# EAGLE library part RK3576 (library RK3576)
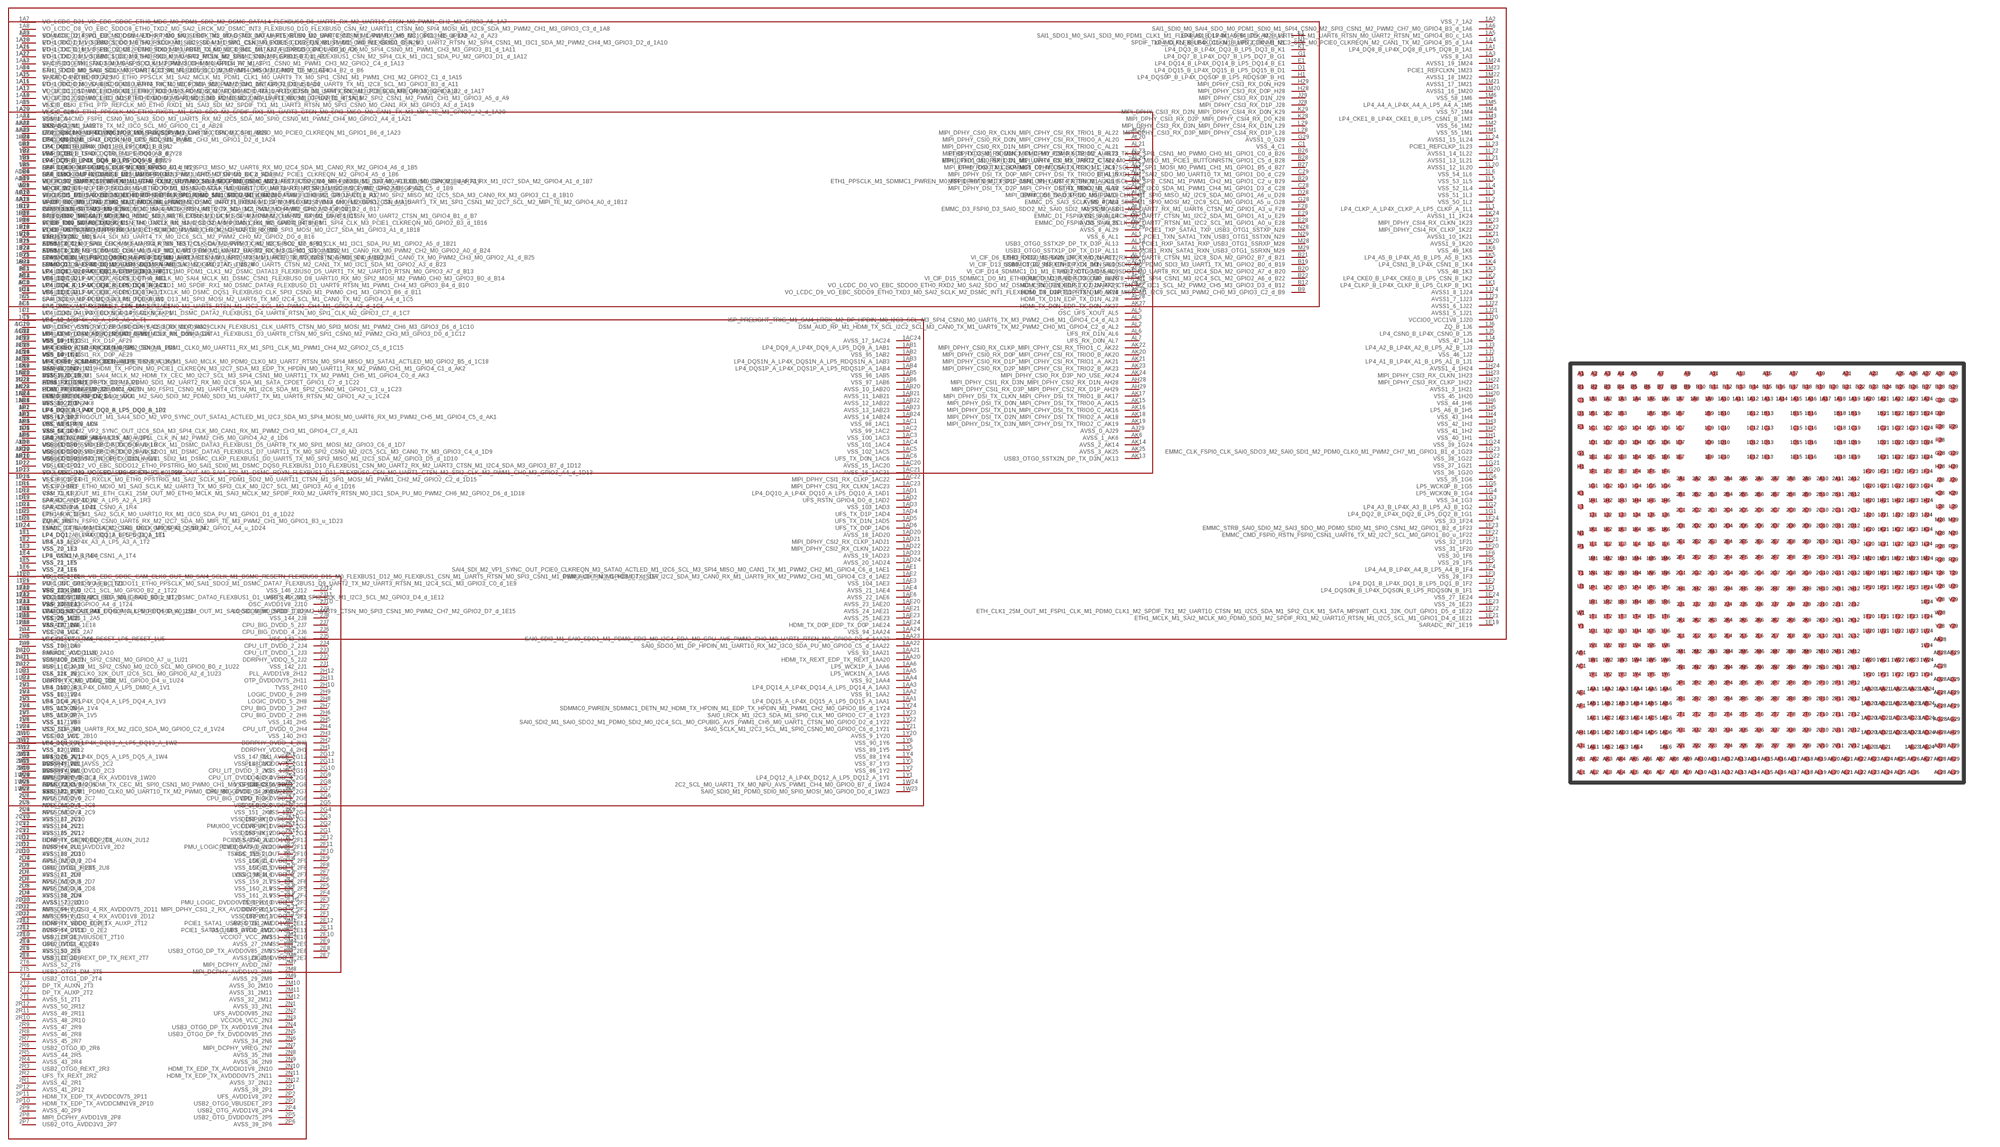
[diagram p0: symbol with the pads of FCCSP-698_L17.2-W16.1-TL_RK3576; footprint FCCSP-698_L17.2-W16.1-TL_RK3576]

Designator prefix U; gates U$1=RK3576_1_DDR_INTERFACE U$2=RK3576_2_CPU_SYS_CONTROL U$3=RK3576_3_VIDEO_CSI_DSI U$4=RK3576_4_HIGH_SPEED_PCIE_USB U$5=RK3576_5_GPIO_AUDIO_SARADC U$6=RK3576_6_POWER_GND

## RK3576  [FCCSP-698_L17.2-W16.1-TL_RK3576]
1A1  U$3:LP4_DQ8_B_LP4X_DQ8_B_LP5_DQ8_B_1A1
1A2  U$3:VSS_7_1A2
1A3  U$3:VSS_8_1A3
1A4  U$3:SPDIF_TX0_M0_FLEXBUS0_D15_M1_UART2_TX_M1_I2C3_SCL_M0_PCIE0_CLKREQN_M2_CAN1_TX_M2_GPIO4_B5_d_1A4
1A5  U$3:SAI1_SDO1_M0_SAI1_SDI3_M0_PDM1_CLK1_M1_FLEXBUS1_D13_M1_SPI4_CLK_M2_UART5_TX_M1_UART6_RTSN_M0_UART2_RTSN_M1_GPIO4_B0_c_1A5
1A6  U$3:SAI1_SDI0_M0_SAI4_SDO_M0_PDM1_SDI0_M1_SPI4_CSN0_M2_SPI3_CSN1_M2_PWM2_CH7_M0_GPIO4_B3_d_1A6
1A7  U$3:VO_LCDC_D21_VO_EBC_GDOE_ETH0_MDC_M0_PDM1_SDI2_M2_DSMC_DATA14_FLEXBUS0_D6_UART1_RX_M2_UART10_CTSN_M0_PWM1_CH2_M3_GPIO3_A6_1A7
1A8  U$3:VO_LCDC_D8_VO_EBC_SDDO8_ETH0_TXD2_M0_SAI2_LRCK_M2_DSMC_INT3_FLEXBUS0_D10_FLEXBUS0_CSN_M2_UART11_CTSN_M0_SPI4_MOSI_M1_I2C9_SDA_M3_PWM2_CH1_M3_GPIO3_C3_d_1A8
1A9  U$3:VO_LCDC_D14_VO_EBC_SDDO14_ETH0_TXD0_M0_SPDIF_TX1_M0_DSMC_DATA8_FLEXBUS0_D0_UART9_CTSN_M1_PWM1_CH5_M3_GPIO3_B5_d_1A9
1A10  U$3:VO_LCDC_D1_VO_EBC_SDDO1_ETH0_RXD3_M0_SAI2_SDI_M2_DSMC_CSN3_FLEXBUS0_D12_FLEXBUS1_D15_M0_FLEXBUS0_CSN_M3_UART2_RTSN_M2_SPI4_CSN1_M1_I3C1_SDA_M2_PWM2_CH4_M3_GPIO3_D2_d_1A10
1A11  U$3:VO_LCDC_D18_VO_EBC_SDCE2_ETH0_RXD1_M0_PDM1_CLK0_M2_DSMC_DATA12_FLEXBUS0_D4_UART10_TX_M0_SPI4_CSN0_M1_PWM1_CH3_M3_GPIO3_B1_d_1A11
1A12  U$3:VO_LCDC_D2_VO_EBC_SDDO2_ETH0_RXCLK_M0_SAI2_MCLK_M2_DSMC_CSN2_FLEXBUS0_D11_FLEXBUS1_CSN_M2_SPI4_CLK_M1_I3C1_SDA_PU_M2_GPIO3_D1_d_1A12
1A13  U$3:VI_CIF_D1_ETH1_TXD3_M0_SAI2_SDO_M1_PDM1_SDI0_M0_UART11_TX_M1_SPI1_CSN0_M1_PWM1_CH3_M2_GPIO2_C4_d_1A13
1A14  U$3:ETH1_TXD0_M0_SAI4_SCLK_M3_UART4_CTSN_M0_I2C5_SCL_M2_PWM1_CH5_M2_GPIO2_C6_d_1A14
1A15  U$3:VI_CIF_D4_ETH1_RXD3_M0_ETH0_PPSCLK_M1_SAI2_MCLK_M1_PDM1_CLK1_M0_UART9_TX_M0_SPI1_CSN1_M1_PWM1_CH1_M2_GPIO2_C1_d_1A15
1A16  U$3:ETH1_RXD0_M0_SAI4_SDO_M3_UART4_RX_M0_I2C6_SDA_M2_PWM2_CH1_M2_GPIO2_D1_d_1A16
1A17  U$3:VI_CIF_D11_SDMMC1_CMD_M1_ETH0_TXD3_M1_SAI0_SDI2_M0_PDM0_SDI1_M3_UART1_CTSN_M1_SPI4_CSN0_M3_PCIE0_CLKREQN_M0_GPIO2_B2_d_1A17
1A18  U$3:VI_CIF_D12_SDMMC1_D3_M1_ETH0_TXD0_M1_SAI0_SDI1_M0_PDM0_SDI2_M3_UART1_RX_M1_GPIO2_B1_d_1A18
1A19  U$3:VI_CIF_CLKI_ETH1_PTP_REFCLK_M0_ETH0_RXD1_M1_SAI3_SDI_M2_SPDIF_TX1_M1_UART3_RTSN_M0_SPI3_CSN0_M0_CAN1_RX_M3_GPIO3_A3_d_1A19
1A20  U$3:VI_CIF_CLKO_ETH1_PPSCLK_M0_ETH0_RXCTL_M1_SAI3_SDO_M2_SPDIF_RX1_M1_UART3_CTSN_M0_SPI3_MISO_M0_CAN1_TX_M3_MIPI_TE_M1_GPIO3_A2_d_1A20
1A21  U$3:SDMMC0_CMD_FSPI1_CSN0_M0_SAI3_SDO_M3_UART5_RX_M2_I2C5_SDA_M0_SPI0_CSN0_M1_PWM2_CH4_M0_GPIO2_A4_d_1A21
1A22  U$3:SARADC_IN1_1A22
1A23  U$3:ETH1_RXCLK_M1_SDMMC1_D2_M0_SAI3_SDO_M1_UART3_CTSN_M2_SPI1_MISO_M0_PCIE0_CLKREQN_M1_GPIO1_B6_d_1A23
1A24  U$3:ETH1_MDC_M1_SAI2_LRCK_M0_I3C0_SCL_M1_PWM1_CH3_M1_GPIO1_D2_d_1A24
1AA1  U$4:LP4_DQ15_A_LP4X_DQ15_A_LP5_DQ15_A_1AA1
1AA2  U$4:VSS_91_1AA2
1AA3  U$4:LP4_DQ14_A_LP4X_DQ14_A_LP5_DQ14_A_1AA3
1AA4  U$4:VSS_92_1AA4
1AA5  U$4:LP5_WCK1N_A_1AA5
1AA6  U$4:LP5_WCK1P_A_1AA6
1AA20  U$4:HDMI_TX_REXT_EDP_TX_REXT_1AA20
1AA21  U$4:VSS_93_1AA21
1AA22  U$4:SAI0_SDO0_M1_DP_HPDIN_M1_UART10_RX_M2_I3C0_SDA_PU_M0_GPIO0_C5_d_1AA22
1AA23  U$4:SAI0_SDI3_M1_SAI0_SDO1_M1_PDM0_SDI3_M0_I2C4_SDA_M0_GPU_AVS_PWM2_CH0_M0_UART1_RTSN_M0_GPIO0_D3_d_1AA23
1AA24  U$4:VSS_94_1AA24
1AB1  U$4:LP4_DQ9_A_LP4X_DQ9_A_LP5_DQ9_A_1AB1
1AB2  U$4:VSS_95_1AB2
1AB3  U$4:LP4_DQS1N_A_LP4X_DQS1N_A_LP5_RDQS1N_A_1AB3
1AB4  U$4:LP4_DQS1P_A_LP4X_DQS1P_A_LP5_RDQS1P_A_1AB4
1AB5  U$4:VSS_96_1AB5
1AB6  U$4:VSS_97_1AB6
1AB20  U$4:AVSS_10_1AB20
1AB21  U$4:AVSS_11_1AB21
1AB22  U$4:AVSS_12_1AB22
1AB23  U$4:AVSS_13_1AB23
1AB24  U$4:AVSS_14_1AB24
1AC1  U$4:VSS_98_1AC1
1AC2  U$4:VSS_99_1AC2
1AC3  U$4:VSS_100_1AC3
1AC4  U$4:VSS_101_1AC4
1AC5  U$4:VSS_102_1AC5
1AC6  U$4:UFS_TX_D0N_1AC6
1AC20  U$4:AVSS_15_1AC20
1AC21  U$4:AVSS_16_1AC21
1AC22  U$4:MIPI_DPHY_CSI1_RX_CLKP_1AC22
1AC23  U$4:MIPI_DPHY_CSI1_RX_CLKN_1AC23
1AC24  U$4:AVSS_17_1AC24
1AD1  U$4:LP4_DQ10_A_LP4X_DQ10_A_LP5_DQ10_A_1AD1
1AD2  U$4:UFS_RSTN_GPIO4_D0_d_1AD2
1AD3  U$4:VSS_103_1AD3
1AD4  U$4:UFS_TX_D1P_1AD4
1AD5  U$4:UFS_TX_D1N_1AD5
1AD6  U$4:UFS_TX_D0P_1AD6
1AD20  U$4:AVSS_18_1AD20
1AD21  U$4:MIPI_DPHY_CSI2_RX_CLKP_1AD21
1AD22  U$4:MIPI_DPHY_CSI2_RX_CLKN_1AD22
1AD23  U$4:AVSS_19_1AD23
1AD24  U$4:AVSS_20_1AD24
1AE1  U$4:SAI4_SDI_M2_VP1_SYNC_OUT_PCIE0_CLKREQN_M3_SATA0_ACTLED_M1_I2C6_SCL_M3_SPI4_MISO_M0_CAN1_TX_M1_PWM2_CH2_M1_GPIO4_C6_d_1AE1
1AE2  U$4:DSM_AUD_RN_M1_HDMI_TX_SDA_I2C2_SDA_M3_CAN0_RX_M1_UART9_RX_M2_PWM2_CH1_M1_GPIO4_C3_d_1AE2
1AE3  U$4:VSS_104_1AE3
1AE4  U$4:AVSS_21_1AE4
1AE6  U$4:AVSS_22_1AE6
1AE20  U$4:AVSS_23_1AE20
1AE21  U$4:AVSS_24_1AE21
1AE23  U$4:AVSS_25_1AE23
1AE24  U$4:HDMI_TX_D0P_EDP_TX_D0P_1AE24
1B1  U$3:LP4_DMI1_B_LP4X_DMI1_B_LP5_DMI1_B_1B1
1B2  U$3:VSS_9_1B2
1B3  U$3:LP4_DQ5_B_LP4X_DQ5_B_LP5_DQ5_B_1B3
1B5  U$3:SAI4_LRCK_M0_PDM1_CLK0_M1_FLEXBUS0_D14_M1_SPI3_MISO_M2_UART6_RX_M0_I2C4_SDA_M1_CAN0_RX_M2_GPIO4_A6_d_1B5
1B6  U$3:SAI1_LRCK_M0_FLEXBUS1_D12_M1_SPI4_CSN1_M2_UART5_CTSN_M1_I2C2_SDA_M2_PCIE1_CLKREQN_M2_GPIO4_A5_d_1B6
1B7  U$3:VO_POST_EMPTY_SPDIF_TX0_M1_CAM_CLK2_OUT_M0_SAI4_SDO_M1_DSMC_INT2_FLEXBUS0_D14_M0_FLEXBUS1_D13_M0_FLEXBUS0_CSN_M1_UART3_RX_M1_I2C7_SDA_M2_GPIO4_A1_d_1B7
1B9  U$3:VO_LCDC_D6_VO_EBC_SDDO6_SAI1_SDO0_M1_DSMC_DATA4_FLEXBUS1_D6_UART8_RX_M0_SPI1_MISO_M2_PWM2_CH2_M3_GPIO3_C5_d_1B9
1B10  U$3:VO_LCDC_D10_VO_EBC_SDDO10_ETH0_PTP_REFCLK_M0_SAI1_SDO2_M1_DSMC_DATA6_FLEXBUS1_D8_UART11_RX_M0_SPI2_MISO_M2_I2C5_SDA_M3_CAN0_RX_M3_GPIO3_C1_d_1B10
1B12  U$3:SPDIF_RX0_M1_CAM_CLK1_OUT_M0_SAI4_LRCK_M1_DSMC_INT0_FLEXBUS0_D13_M0_FLEXBUS1_D14_M0_FLEXBUS1_CSN_M3_UART3_TX_M1_SPI1_CSN1_M2_I2C7_SCL_M2_MIPI_TE_M2_GPIO4_A0_d_1B12
1B13  U$3:ISP_PRELIGHT_TRIG_M0_ETH1_MDC_M0_UART6_RTSN_M1_I2C9_SDA_M2_PWM2_CH4_M2_GPIO2_D4_d_1B13
1B15  U$3:SP_FLASH_TRIGOUT_M0_ETH1_MDIO_M0_UART6_CTSN_M1_I2C9_SCL_M2_PWM2_CH5_M2_GPIO2_D5_d_1B15
1B16  U$3:VI_CIF_D10_SDMMC1_CLK_M1_ETH0_TXCLK_M1_SAI0_SDO2_M0_PDM0_CLK1_M3_UART1_RTSN_M1_SPI4_CLK_M3_PCIE1_CLKREQN_M0_GPIO2_B3_d_1B16
1B18  U$3:VI_CIF_VSYNC_ETH1_PPSTRIG_M0_ETH0_MDC_M1_SAI3_LRCK_M2_UART3_RX_M0_SPI3_MOSI_M0_I2C7_SDA_M1_GPIO3_A1_d_1B18
1B19  U$3:SARADC_IN2_1B19
1B21  U$3:SDMMC0_CLK_FSPI1_CLK_M0_SAI3_SCLK_M3_TEST_CLK_OUT_UART5_TX_M2_I2C5_SCL_M0_SPI0_CLK_M1_I3C1_SDA_PU_M1_GPIO2_A5_d_1B21
1B22  U$3:ETH1_TXCLK_M1_SDMMC1_CLK_M0_SAI3_MCLK_M1_PDM0_CLK0_M2_UART3_RX_M2_GPIO1_C1_d_1B22
1B23  U$3:ETH1_TXD0_M1_FSPI1_D0_M1_UART4_TX_M1_UART2_RTSN_M0_SPI2_MOSI_M1_PCIE0_BUTTONRSTN_GPIO1_C4_d_1B23
1B24  U$3:EMMC_D7_SAI0_SDO0_M2_SAI3_SDI_M0_SPI0_CLK_M2_GPIO1_A7_u_1B24
1C1  U$3:LP4_DQ13_B_LP4X_DQ13_B_LP5_DQ13_B_1C1
1C2  U$3:VSS_10_1C2
1C3  U$3:LP4_DQ4_B_LP4X_DQ4_B_LP5_DQ4_B_1C3
1C4  U$3:VSS_11_1C4
1C5  U$3:SAI4_SCLK_M0_PDM1_SDI3_M1_FLEXBUS0_D13_M1_SPI3_MOSI_M2_UART6_TX_M0_I2C4_SCL_M1_CAN0_TX_M2_GPIO4_A4_d_1C5
1C6  U$3:SAI1_SCLK_M0_FLEXBUS1_CSN_M4_SPI3_CSN0_M2_UART5_RTSN_M1_I2C2_SCL_M2_PWM2_CH4_M1_GPIO4_A3_d_1C6
1C7  U$3:VO_LCDC_D4_VO_EBC_SDDO4_SAI1_SCLK_M1_DSMC_DATA2_FLEXBUS1_D4_UART8_RTSN_M0_SPI1_CLK_M2_GPIO3_C7_d_1C7
1C9  U$3:VSS_12_1C9
1C10  U$3:VO_LCDC_VSYNC_VO_EBC_SDCLK_SAI1_SDI3_M1_DSMC_CLKN_FLEXBUS1_CLK_UART5_CTSN_M0_SPI3_MOSI_M1_PWM2_CH6_M3_GPIO3_D6_d_1C10
1C12  U$3:VO_LCDC_D3_VO_EBC_SDDO3_SAI1_MCLK_M1_DSMC_DATA1_FLEXBUS1_D3_UART8_CTSN_M0_SPI1_CSN0_M2_PWM2_CH3_M3_GPIO3_D0_d_1C12
1C13  U$3:VSS_13_1C13
1C15  U$3:VI_CIF_D0_ETH1_TXCLK_M0_SAI2_SDI_M1_PDM1_CLK0_M0_UART11_RX_M1_SPI1_CLK_M1_PWM1_CH4_M2_GPIO2_C5_d_1C15
1C16  U$3:VSS_14_1C16
1C18  U$3:VI_CIF_D8_SDMMC1_DETN_M1_ETH0_RXCLK_M1_SAI0_MCLK_M0_PDM0_CLK0_M3_UART7_RTSN_M0_SPI4_MISO_M3_SATA1_ACTLED_M0_GPIO2_B5_d_1C18
1C19  U$3:SARADC_IN3_1C19
1C21  U$3:VSS_15_1C21
1C22  U$3:ETH1_RXD0_M1_FSPI1_D3_M1_PDM0_SDI1_M2_UART2_RX_M0_I2C8_SDA_M1_SATA_CPDET_GPIO1_C7_d_1C22
1C23  U$3:ETH1_PPSTRIG_M1_SDMMC1_DETN_M0_FSPI1_CSN0_M1_UART4_CTSN_M1_I2C6_SDA_M1_SPI2_CSN0_M1_GPIO1_C3_u_1C23
1C24  U$3:EMMC_D2_FSPI0_D2_SAI0_SDO1_M2_SAI0_SDI3_M2_PDM0_SDI3_M1_UART7_TX_M1_UART6_RTSN_M2_GPIO1_A2_u_1C24
1D1  U$3:VSS_16_1D1
1D2  U$3:LP4_DQ0_B_LP4X_DQ0_B_LP5_DQ0_B_1D2
1D3  U$3:VSS_17_1D3
1D4  U$3:LP5_WCK1P_B_1D4
1D5  U$3:VSS_18_1D5
1D6  U$3:SAI1_MCLK_M0_SAI4_MCLK_M0_AUPLL_CLK_IN_M2_PWM2_CH5_M0_GPIO4_A2_d_1D6
1D7  U$3:VO_LCDC_D5_VO_EBC_SDDO5_SAI1_LRCK_M1_DSMC_DATA3_FLEXBUS1_D5_UART8_TX_M0_SPI1_MOSI_M2_GPIO3_C6_d_1D7
1D9  U$3:VO_LCDC_D7_VO_EBC_SDDO7_SAI1_SDO1_M1_DSMC_DATA5_FLEXBUS1_D7_UART11_TX_M0_SPI2_CSN0_M2_I2C5_SCL_M3_CAN0_TX_M3_GPIO3_C4_d_1D9
1D10  U$3:VO_LCDC_HSYNC_VO_EBC_GDCLK_SAI1_SDI2_M1_DSMC_CLKP_FLEXBUS1_D0_UART5_TX_M0_SPI3_MISO_M1_I2C3_SDA_M2_GPIO3_D5_d_1D10
1D12  U$3:VO_LCDC_D12_VO_EBC_SDDO12_ETH0_PPSTRIG_M0_SAI1_SDI0_M1_DSMC_DQS0_FLEXBUS1_D10_FLEXBUS1_CSN_M0_UART2_RX_M2_UART3_CTSN_M1_I2C4_SDA_M3_GPIO3_B7_d_1D12
1D13  U$3:VO_LCDC_D23_VO_EBC_SDSHR_ETH_CLK0_25M_OUT_M0_SAI4_SDI_M1_DSMC_RDYN_FLEXBUS1_D11_FLEXBUS0_CSN_M0_UART1_CTSN_M2_SPI2_CLK_M2_PWM1_CH0_M3_GPIO3_A4_d_1D13
1D15  U$3:VI_CIF_D3_ETH1_RXCLK_M0_ETH0_PPSTRIG_M1_SAI2_SCLK_M1_PDM1_SDI2_M0_UART11_CTSN_M1_SPI1_MOSI_M1_PWM1_CH2_M2_GPIO2_C2_d_1D15
1D16  U$3:VI_CIF_HREF_ETH0_MDIO_M1_SAI3_SCLK_M2_UART3_TX_M0_SPI3_CLK_M0_I2C7_SCL_M1_GPIO3_A0_d_1D16
1D18  U$3:CAM_CLK1_OUT_M1_ETH_CLK1_25M_OUT_M0_ETH0_MCLK_M1_SAI3_MCLK_M2_SPDIF_RX0_M2_UART9_RTSN_M0_I3C1_SDA_PU_M0_PWM2_CH6_M2_GPIO2_D6_d_1D18
1D19  U$3:SARADC_IN5_1D19
1D21  U$3:SARADC_IN6_1D21
1D22  U$3:ETH1_RXCTL_M1_SAI2_SCLK_M0_UART10_RX_M1_I3C0_SDA_PU_M1_GPIO1_D1_d_1D22
1D23  U$3:EMMC_RSTN_FSPI0_CSN0_UART6_RX_M2_I2C7_SDA_M0_MIPI_TE_M3_PWM2_CH1_M0_GPIO1_B3_u_1D23
1D24  U$3:EMMC_D4_SAI0_MCLK_M2_SAI3_MCLK_M0_SPI0_CSN0_M2_GPIO1_A4_u_1D24
1E1  U$3:LP4_DQ12_B_LP4X_DQ12_B_LP5_DQ1_1E1
1E2  U$3:VSS_19_1E2
1E3  U$3:VSS_20_1E3
1E4  U$3:LP5_WCK1N_B_1E4
1E5  U$3:VSS_21_1E5
1E6  U$3:VSS_22_1E6
1E7  U$3:VO_LCDC_CLK_VO_EBC_SDOE_CAM_CLK0_OUT_M0_SAI4_SCLK_M1_DSMC_RESETN_FLEXBUS0_D15_M0_FLEXBUS1_D12_M0_FLEXBUS1_CSN_M1_UART5_RTSN_M0_SPI3_CSN1_M1_PWM2_CH7_M3_GPIO3_D7_d_1E7
1E9  U$3:VO_LCDC_D11_VO_EBC_SDDO11_ETH0_PPSCLK_M0_SAI1_SDO3_M1_DSMC_DATA7_FLEXBUS1_D9_UART2_TX_M2_UART3_RTSN_M1_I2C4_SCL_M3_GPIO3_C0_d_1E9
1E10  U$3:VSS_23_1E10
1E12  U$3:VO_LCDC_DEN_VO_EBC_SDLE_SAI1_SDI1_M1_DSMC_DATA0_FLEXBUS1_D1_UART5_RX_M0_SPI3_CLK_M1_I2C3_SCL_M2_GPIO3_D4_d_1E12
1E13  U$3:VSS_24_1E13
1E15  U$3:CAM_CLK2_OUT_M1_ETH1_MCLK_M0_ETH_CLK0_25M_OUT_M1_SAI0_SDO3_M0_SPDIF_TX0_M2_UART9_CTSN_M0_SPI3_CSN1_M0_PWM2_CH7_M2_GPIO2_D7_d_1E15
1E16  U$3:VSS_25_1E16
1E18  U$3:SARADC_IN4_1E18
1E19  U$3:SARADC_IN7_1E19
1E21  U$3:ETH1_MCLK_M1_SAI2_MCLK_M0_PDM0_SDI3_M2_SPDIF_RX1_M2_UART10_RTSN_M1_I2C5_SCL_M1_GPIO1_D4_d_1E21
1E22  U$3:ETH_CLK1_25M_OUT_M1_FSPI1_CLK_M1_PDM0_CLK1_M2_SPDIF_TX1_M2_UART10_CTSN_M1_I2C5_SDA_M1_SPI2_CLK_M1_SATA_MPSWIT_CLK1_32K_OUT_GPIO1_D5_d_1E22
1E23  U$3:VSS_26_1E23
1E24  U$3:VSS_27_1E24
1F1  U$3:LP4_DQS0N_B_LP4X_DQS0N_B_LP5_RDQS0N_B_1F1
1F2  U$3:LP4_DQ1_B_LP4X_DQ1_B_LP5_DQ1_B_1F2
1F3  U$3:VSS_28_1F3
1F4  U$3:LP4_A4_B_LP4X_A4_B_LP5_A4_B_1F4
1F5  U$3:VSS_29_1F5
1F6  U$3:VSS_30_1F6
1F20  U$3:VSS_31_1F20
1F21  U$3:VSS_32_1F21
1F22  U$3:EMMC_CMD_FSPI0_RSTN_FSPI0_CSN1_UART6_TX_M2_I2C7_SCL_M0_GPIO1_B0_u_1F22
1F23  U$3:EMMC_STRB_SAI0_SDI0_M2_SAI3_SDO_M0_PDM0_SDI0_M1_SPI0_CSN1_M2_GPIO1_B2_d_1F23
1F24  U$3:VSS_33_1F24
1G1  U$3:LP4_DQ2_B_LP4X_DQ2_B_LP5_DQ2_B_1G1
1G2  U$3:LP4_A3_B_LP4X_A3_B_LP5_A3_B_1G2
1G3  U$3:VSS_34_1G3
1G4  U$3:LP5_WCK0N_B_1G4
1G5  U$3:LP5_WCK0P_B_1G5
1G6  U$3:VSS_35_1G6
1G20  U$3:VSS_36_1G20
1G21  U$3:VSS_37_1G21
1G22  U$3:VSS_38_1G22
1G23  U$3:EMMC_CLK_FSPI0_CLK_SAI0_SDO3_M2_SAI0_SDI1_M2_PDM0_CLK0_M1_PWM2_CH7_M1_GPIO1_B1_d_1G23
1G24  U$3:VSS_39_1G24
1H1  U$3:VSS_40_1H1
1H2  U$3:VSS_41_1H2
1H3  U$3:VSS_42_1H3
1H4  U$3:VSS_43_1H4
1H5  U$3:LP5_A6_B_1H5
1H6  U$3:VSS_44_1H6
1H20  U$3:VSS_45_1H20
1H21  U$3:AVSS1_3_1H21
1H22  U$3:MIPI_DPHY_CSI3_RX_CLKP_1H22
1H23  U$3:MIPI_DPHY_CSI3_RX_CLKN_1H23
1H24  U$3:AVSS1_4_1H24
1J1  U$3:LP4_A1_B_LP4X_A1_B_LP5_A1_B_1J1
1J2  U$3:VSS_46_1J2
1J3  U$3:LP4_A2_B_LP4X_A2_B_LP5_A2_B_1J3
1J4  U$3:VSS_47_1J4
1J5  U$3:LP4_CSN0_B_LP4X_CSN0_B_1J5
1J6  U$3:ZQ_B_1J6
1J20  U$3:VCCIO0_VCC1V8_1J20
1J21  U$3:AVSS1_5_1J21
1J22  U$3:AVSS1_6_1J22
1J23  U$3:AVSS1_7_1J23
1J24  U$3:AVSS1_8_1J24
1K1  U$3:LP4_CLKP_B_LP4X_CLKP_B_LP5_CLKP_B_1K1
1K2  U$3:LP4_CKE0_B_LP4X_CKE0_B_LP5_CSN_B_1K2
1K3  U$3:VSS_48_1K3
1K4  U$3:LP4_CSN1_B_LP4X_CSN1_B_1K4
1K5  U$3:LP4_A5_B_LP4X_A5_B_LP5_A5_B_1K5
1K6  U$3:VSS_49_1K6
1K20  U$3:AVSS1_9_1K20
1K21  U$3:AVSS1_10_1K21
1K22  U$3:MIPI_DPHY_CSI4_RX_CLKP_1K22
1K23  U$3:MIPI_DPHY_CSI4_RX_CLKN_1K23
1K24  U$3:AVSS1_11_1K24
1L1  U$3:LP4_CLKP_A_LP4X_CLKP_A_LP5_CLKP_A_1L1
1L2  U$3:VSS_50_1L2
1L3  U$3:VSS_51_1L3
1L4  U$3:VSS_52_1L4
1L5  U$3:VSS_53_1L5
1L6  U$3:VSS_54_1L6
1L20  U$3:AVSS1_12_1L20
1L21  U$3:AVSS1_13_1L21
1L22  U$3:AVSS1_14_1L22
1L23  U$3:PCIE1_REFCLKP_1L23
1L24  U$3:AVSS1_15_1L24
1M1  U$3:VSS_55_1M1
1M2  U$3:VSS_56_1M2
1M3  U$3:LP4_CKE1_B_LP4X_CKE1_B_LP5_CSN1_B_1M3
1M4  U$3:VSS_57_1M4
1M5  U$3:LP4_A4_A_LP4X_A4_A_LP5_A4_A_1M5
1M6  U$3:VSS_58_1M6
1M20  U$3:AVSS1_16_1M20
1M21  U$3:AVSS1_17_1M21
1M22  U$3:AVSS1_18_1M22
1M23  U$3:PCIE1_REFCLKN_1M23
1M24  U$3:AVSS1_19_1M24
1N1  U$4:LP4_A1_A_LP4X_A1_A_LP5_A1_A_1N1
1N2  U$4:VSS_59_1N2
1N3  U$4:LP4_CKE0_A_LP4X_CKE0_A_LP5_CSN0_A_1N3
1N4  U$4:VSS_60_1N4
1N5  U$4:LP4_CKE1_A_LP4X_CKE1_A_LP5_CSN1_A_1N5
1N6  U$4:VSS_61_1N6
1N20  U$4:AVSS1_20_1N20
1N21  U$4:AVSS1_21_1N21
1N22  U$4:PCIE0_REFCLKP_1N22
1N23  U$4:PCIE0_REFCLKN_1N23
1N24  U$4:AVSS1_22_1N24
1P1  U$4:LP4_DQ2_A_LP4X_DQ2_A_LP5_DQ2_A_1P1
1P2  U$4:VSS_62_1P2
1P3  U$4:VSS_63_1P3
1P4  U$4:VSS_64_1P4
1P5  U$4:LP4_A5_A_LP4X_A5_A_LP5_A5_A_1P5
1P6  U$4:VSS_65_1P6
1P20  U$4:VSS_66_1P20
1P21  U$4:VSS_67_1P21
1P22  U$4:VSS_68_1P22
1P23  U$4:SPI2_MISO_M0_I2C0_SDA_M0_GPIO0_B1_z_1P23
1P24  U$4:VSS_69_1P24
1R1  U$4:VSS_70_1R1
1R2  U$4:VSS_71_1R2
1R3  U$4:LP4_A2_A_LP4X_A2_A_LP5_A2_A_1R3
1R4  U$4:LP4_CSN0_A_LP4X_CSN0_A_1R4
1R5  U$4:LP5_A6_A_1R5
1R6  U$4:ZQ_A_1R6
1R24  U$4:TSADC_CTRL_M0_TSADC_CTRL_ORG_GPIO0_A1_z_1R24
1T1  U$4:LP4_DQ1_A_LP4X_DQ1_A_LP5_DQ1_A_1T1
1T2  U$4:LP4_A3_A_LP4X_A3_A_LP5_A3_A_1T2
1T3  U$4:VSS_72_1T3
1T4  U$4:LP4_CSN1_A_LP4X_CSN1_A_1T4
1T5  U$4:VSS_73_1T5
1T6  U$4:VSS_74_1T6
1T20  U$4:VSS_75_1T20
1T21  U$4:PMIC_INT_GPIO0_A6_u_1T21
1T22  U$4:SPI2_CLK_M0_I2C1_SCL_M0_GPIO0_B2_z_1T22
1T23  U$4:SPI2_MOSI_M0_I2C1_SDA_M0_GPIO0_B3_z_1T23
1T24  U$4:PWR_CTRL2_GPIO0_A4_d_1T24
1U1  U$4:LP4_DQS0P_A_LP4X_DQS0P_A_LP5_RDQS0P_A_1U1
1U2  U$4:VSS_76_1U2
1U3  U$4:VSS_77_1U3
1U4  U$4:VSS_78_1U4
1U5  U$4:LP4_RESET_LP4X_RESET_LP5_RESET_1U5
1U6  U$4:VSS_79_1U6
1U20  U$4:PMUIO1_VCC_1U20
1U21  U$4:SDMMC0_DETN_SPI2_CSN1_M0_GPIO0_A7_u_1U21
1U22  U$4:AUPLL_CLK_IN_M1_SPI2_CSN0_M0_I2C0_SCL_M0_GPIO0_B0_z_1U22
1U23  U$4:CLK_32K_IN_CLK0_32K_OUT_I2C6_SCL_M0_GPIO0_A2_d_1U23
1U24  U$4:UART0_TX_M0_JTAG_TCK_M1_GPIO0_D4_u_1U24
1V1  U$4:LP4_DMI0_A_LP4X_DMI0_A_LP5_DMI0_A_1V1
1V2  U$4:VSS_80_1V2
1V3  U$4:LP4_DQ4_A_LP4X_DQ4_A_LP5_DQ4_A_1V3
1V4  U$4:LP5_WCK0N_A_1V4
1V5  U$4:LP5_WCK0P_A_1V5
1V6  U$4:VSS_81_1V6
1V24  U$4:I2C0_SDA_M1_UART8_RX_M2_I3C0_SDA_M0_GPIO0_C2_d_1V24
1W1  U$4:VSS_82_1W1
1W2  U$4:LP4_DQ13_A_LP4X_DQ13_A_LP5_DQ13_A_1W2
1W3  U$4:VSS_83_1W3
1W4  U$4:LP4_DQ5_A_LP4X_DQ5_A_LP5_DQ5_A_1W4
1W5  U$4:VSS_84_1W5
1W6  U$4:VSS_85_1W6
1W20  U$4:MIPI_DPHY_CSI1_2_RX_AVDD1V8_1W20
1W21  U$4:PDM0_CLK1_M0_HDMI_TX_CEC_M1_SPI0_CSN1_M0_PWM0_CH1_M0_GPIO0_C3_d_1W21
1W22  U$4:SAI0_MCLK_M1_PDM0_CLK0_M0_UART10_TX_M2_PWM0_CH0_M0_GPIO0_C4_d_1W22
1W23  U$4:SAI0_SDI0_M1_PDM0_SDI0_M0_SPI0_MOSI_M0_GPIO0_D0_d_1W23
1W24  U$4:2C2_SCL_M0_UART1_TX_M0_NPU_AVS_PWM1_CH4_M0_GPIO0_B7_d_1W24
1Y1  U$4:LP4_DQ12_A_LP4X_DQ12_A_LP5_DQ12_A_1Y1
1Y2  U$4:VSS_86_1Y2
1Y3  U$4:VSS_87_1Y3
1Y4  U$4:VSS_88_1Y4
1Y5  U$4:VSS_89_1Y5
1Y6  U$4:VSS_90_1Y6
1Y20  U$4:AVSS_9_1Y20
1Y21  U$4:SAI0_SCLK_M1_I2C3_SCL_M1_SPI0_CSN0_M0_GPIO0_C6_d_1Y21
1Y22  U$4:SAI0_SDI2_M1_SAI0_SDO2_M1_PDM0_SDI2_M0_I2C4_SCL_M0_CPUBIG_AVS_PWM1_CH5_M0_UART1_CTSN_M0_GPIO0_D2_d_1Y22
1Y23  U$4:SAI0_LRCK_M1_I2C3_SDA_M1_SPI0_CLK_M0_GPIO0_C7_d_1Y23
1Y24  U$4:SDMMC0_PWREN_SDMMC1_DETN_M2_HDMI_TX_HPDIN_M1_EDP_TX_HPDIN_M1_PWM1_CH2_M0_GPIO0_B6_d_1Y24
2A1  U$5:VSS_105_2A1
2A2  U$5:VCCIO2_VCC_2A2
2A3  U$5:VSS_106_2A3
2A4  U$5:VCCIO5_VCC_0_2A4
2A5  U$5:VCCIO5_VCC_1_2A5
2A6  U$5:VSS_107_2A6
2A7  U$5:VCCIO4_VCC_2A7
2A8  U$5:VCCIO1_VCC_2A8
2A9  U$5:VSS_108_2A9
2A10  U$5:SARADC_AVDD1V8_2A10
2A11  U$5:VSS_109_2A11
2A12  U$5:VSS_110_2A12
2B1  U$5:VSS_111_2B1
2B2  U$5:DDRPHY_CKE_VDDQ_2B2
2B3  U$5:VSS_112_2B3
2B4  U$5:VSS_113_2B4
2B5  U$5:VSS_114_2B5
2B6  U$5:VSS_115_2B6
2B7  U$5:VSS_116_2B7
2B8  U$5:VSS_117_2B8
2B9  U$5:VSS_118_2B9
2B10  U$5:VCCIO3_VCC_2B10
2B11  U$5:VSS_119_2B11
2B12  U$5:VSS_120_2B12
2C1  U$5:VSS_121_2C1
2C2  U$5:DDRPHY_PLL_AVSS_2C2
2C3  U$5:DDRPHY_PLL_DVDD_2C3
2C4  U$5:GPU_DVDD_0_2C4
2C5  U$5:GPU_DVDD_1_2C5
2C6  U$5:VSS_122_2C6
2C7  U$5:NPU_DVDD_0_2C7
2C8  U$5:NPU_DVDD_1_2C8
2C9  U$5:NPU_DVDD_2_2C9
2C10  U$5:VSS_123_2C10
2C11  U$5:VSS_124_2C11
2C12  U$5:VSS_125_2C12
2D1  U$5:DDRPHY_CK_VDDQ_2D1
2D2  U$5:DDRPHY_PLL_AVDD1V8_2D2
2D3  U$5:VSS_126_2D3
2D4  U$5:GPU_DVDD_2_2D4
2D5  U$5:GPU_DVDD_3_2D5
2D6  U$5:VSS_127_2D6
2D7  U$5:NPU_DVDD_3_2D7
2D8  U$5:NPU_DVDD_4_2D8
2D9  U$5:VSS_128_2D9
2D10  U$5:AVSS1_23_2D10
2D11  U$5:MIPI_DPHY_CSI3_4_RX_AVDD0V75_2D11
2D12  U$5:MIPI_DPHY_CSI3_4_RX_AVDD1V8_2D12
2E1  U$5:DDRPHY_VDDQ_0_2E1
2E2  U$5:DDRPHY_DVDD_0_2E2
2E3  U$5:VSS_129_2E3
2E4  U$5:GPU_DVDD_4_2E4
2E5  U$5:VSS_130_2E5
2E6  U$5:VSS_131_2E6
2E7  U$5:LOGIC_DVDD_0_2E7
2E8  U$5:VSS_132_2E8
2E9  U$5:VSS_133_2E9
2E10  U$5:AVSS1_24_2E10
2E11  U$5:PCIE1_SATA1_USB3_OTG1_AVDD0V85_2E11
2E12  U$5:PCIE1_SATA1_USB3_OTG1_AVDD1V8_2E12
2F1  U$5:DDRPHY_VDDQ_1_2F1
2F2  U$5:DDRPHY_VDDQ_2_2F2
2F3  U$5:DDRPHY_DVDD_1_2F3
2F4  U$5:VSS_134_2F4
2F5  U$5:VSS_135_2F5
2F6  U$5:VSS_136_2F6
2F7  U$5:LOGIC_MEM_DVDD_0_2F7
2F8  U$5:LOGIC_DVDD_1_2F8
2F9  U$5:LOGIC_DVDD_2_2F9
2F10  U$5:TSADC_TEST_OUT_TS_2F10
2F11  U$5:PCIE0_SATA0_AVDD0V85_2F11
2F12  U$5:PCIE0_SATA0_AVDD1V8_2F12
2G1  U$5:DDRPHY_VDDQ_3_2G1
2G2  U$5:DDRPHY_DVDD_2_2G2
2G3  U$5:DDRPHY_DVDD_3_2G3
2G4  U$5:VSS_137_2G4
2G5  U$5:CPU_BIG_DVDD_0_2G5
2G6  U$5:CPU_BIG_DVDD_1_2G6
2G7  U$5:VSS_138_2G7
2G8  U$5:LOGIC_DVDD_3_2G8
2G9  U$5:LOGIC_DVDD_4_2G9
2G10  U$5:VSS_139_2G10
2G11  U$5:PLL_DVDD0V75_2G11
2G12  U$5:PLL_AVSS_2G12
2H1  U$5:DDRPHY_VDDQ_4_2H1
2H2  U$5:DDRPHY_DVDD_4_2H2
2H3  U$5:VSS_140_2H3
2H4  U$5:CPU_LIT_DVDD_0_2H4
2H5  U$5:VSS_141_2H5
2H6  U$5:CPU_BIG_DVDD_2_2H6
2H7  U$5:CPU_BIG_DVDD_3_2H7
2H8  U$5:LOGIC_DVDD_5_2H8
2H9  U$5:LOGIC_DVDD_6_2H9
2H10  U$5:TVSS_2H10
2H11  U$5:OTP_DVDD0V75_2H11
2H12  U$5:PLL_AVDD1V8_2H12
2J1  U$5:VSS_142_2J1
2J2  U$5:DDRPHY_VDDQ_5_2J2
2J3  U$5:CPU_LIT_DVDD_1_2J3
2J4  U$5:CPU_LIT_DVDD_2_2J4
2J5  U$5:VSS_143_2J5
2J6  U$5:CPU_BIG_DVDD_4_2J6
2J7  U$5:CPU_BIG_DVDD_5_2J7
2J8  U$5:VSS_144_2J8
2J9  U$5:LOGIC_MEM_DVDD_1_2J9
2J10  U$5:OSC_AVDD1V8_2J10
2J11  U$5:VSS_145_2J11
2J12  U$5:VSS_146_2J12
2K1  U$6:VSS_147_2K1
2K2  U$6:VSS_148_2K2
2K3  U$6:CPU_LIT_DVDD_3_2K3
2K4  U$6:CPU_LIT_DVDD_4_2K4
2K5  U$6:VSS_149_2K5
2K6  U$6:CPU_BIG_DVDD_6_2K6
2K7  U$6:CPU_BIG_DVDD_7_2K7
2K8  U$6:VSS_150_2K8
2K9  U$6:VSS_151_2K9
2K10  U$6:VSS_152_2K10
2K11  U$6:PMUIO0_VCC1V8_2K11
2K12  U$6:VSS_153_2K12
2L1  U$6:VSS_154_2L1
2L2  U$6:PMU_LOGIC_DVDD0V75_0_2L2
2L3  U$6:VSS_155_2L3
2L4  U$6:VSS_156_2L4
2L5  U$6:VSS_157_2L5
2L6  U$6:VSS_158_2L6
2L7  U$6:VSS_159_2L7
2L8  U$6:VSS_160_2L8
2L9  U$6:VSS_161_2L9
2L10  U$6:PMU_LOGIC_DVDD0V75_1_2L10
2L11  U$6:MIPI_DPHY_CSI1_2_RX_AVDD0V7_2L11
2L12  U$6:VSS_162_2L12
2M1  U$6:AVSS_26_2M1
2M2  U$6:OSC_UFS_AVDD_2M2
2M3  U$6:VCCIO7_VCC_2M3
2M4  U$6:AVSS_27_2M4
2M5  U$6:USB3_OTG0_DP_TX_AVDD0V85_2M5
2M6  U$6:AVSS_28_2M6
2M7  U$6:MIPI_DCPHY_AVDD_2M7
2M8  U$6:MIPI_DCPHY_AVDD1V2_2M8
2M9  U$6:AVSS_29_2M9
2M10  U$6:AVSS_30_2M10
2M11  U$6:AVSS_31_2M11
2M12  U$6:AVSS_32_2M12
2N1  U$6:AVSS_33_2N1
2N2  U$6:UFS_AVDD0V85_2N2
2N3  U$6:VCCIO6_VCC_2N3
2N4  U$6:USB3_OTG0_DP_TX_AVDD1V8_2N4
2N5  U$6:USB3_OTG0_DP_TX_DVDD0V85_2N5
2N6  U$6:AVSS_34_2N6
2N7  U$6:MIPI_DCPHY_VREG_2N7
2N8  U$6:AVSS_35_2N8
2N9  U$6:AVSS_36_2N9
2N10  U$6:HDMI_TX_EDP_TX_AVDDIO1V8_2N10
2N11  U$6:HDMI_TX_EDP_TX_AVDDD0V75_2N11
2N12  U$6:AVSS_37_2N12
2P1  U$6:AVSS_38_2P1
2P2  U$6:UFS_AVDD1V8_2P2
2P3  U$6:USB2_OTG0_VBUSDET_2P3
2P4  U$6:USB2_OTG_AVDD1V8_2P4
2P5  U$6:USB2_OTG_DVDD0V75_2P5
2P6  U$6:AVSS_39_2P6
2P7  U$6:USB2_OTG_AVDD3V3_2P7
2P8  U$6:MIPI_DCPHY_AVDD1V8_2P8
2P9  U$6:AVSS_40_2P9
2P10  U$6:HDMI_TX_EDP_TX_AVDDCMN1V8_2P10
2P11  U$6:HDMI_TX_EDP_TX_AVDDC0V75_2P11
2P12  U$6:AVSS_41_2P12
2R1  U$6:AVSS_42_2R1
2R2  U$6:UFS_TX_REXT_2R2
2R3  U$6:USB2_OTG0_REXT_2R3
2R4  U$6:AVSS_43_2R4
2R5  U$6:AVSS_44_2R5
2R6  U$6:USB2_OTG0_ID_2R6
2R7  U$6:AVSS_45_2R7
2R8  U$6:AVSS_46_2R8
2R9  U$6:AVSS_47_2R9
2R10  U$6:AVSS_48_2R10
2R11  U$6:AVSS_49_2R11
2R12  U$6:AVSS_50_2R12
2T1  U$6:AVSS_51_2T1
2T2  U$6:DP_TX_AUXP_2T2
2T3  U$6:DP_TX_AUXN_2T3
2T4  U$6:USB2_OTG1_DP_2T4
2T5  U$6:USB2_OTG1_DM_2T5
2T6  U$6:AVSS_52_2T6
2T7  U$6:USB3_OTG0_REXT_DP_TX_REXT_2T7
2T8  U$6:AVSS_53_2T8
2T9  U$6:USB2_OTG1_ID_2T9
2T10  U$6:USB2_OTG1_VBUSDET_2T10
2T11  U$6:AVSS_54_2T11
2T12  U$6:HDMI_TX_SBDP_EDP_TX_AUXP_2T12
2U1  U$6:AVSS_55_2U1
2U2  U$6:AVSS_56_2U2
2U3  U$6:AVSS_57_2U3
2U4  U$6:AVSS_58_2U4
2U5  U$6:AVSS_59_2U5
2U6  U$6:AVSS_60_2U6
2U7  U$6:AVSS_61_2U7
2U8  U$6:USB2_OTG1_REXT_2U8
2U9  U$6:AVSS_62_2U9
2U10  U$6:AVSS_63_2U10
2U11  U$6:AVSS_64_2U11
2U12  U$6:HDMI_TX_SBDN_EDP_TX_AUXN_2U12
2V1  U$6:AVSS_65_2V1
2V2  U$6:AVSS_66_2V2
2V3  U$6:AVSS_67_2V3
2V4  U$6:AVSS_68_2V4
2V5  U$6:AVSS_69_2V5
2V6  U$6:AVSS_70_2V6
2V7  U$6:AVSS_71_2V7
2V8  U$6:AVSS_72_2V8
2V9  U$6:AVSS_73_2V9
2V10  U$6:AVSS_74_2V10
2V11  U$6:AVSS_75_2V11
2V12  U$6:AVSS_76_2V12
A1  U$1:VSS_0_A1
A2  U$1:LP4_DQ11_B_LP4X_DQ11_B_LP5_DQ11_B_A2
A3  U$1:LP4_DQS1P_B_LP4X_DQS1P_B_LP5_RDQS1P_B_A3
A4  U$1:VSS_1_A4
A5  U$1:LP4_DQ6_B_LP4X_DQ6_B_LP5_DQ6_B_A5
A7  U$1:SAI1_SDO0_M0_SAI4_SDI_M0_SPI3_CLK_M2_PWM2_CH6_M0_GPIO4_A7_d_A7
A9  U$1:VO_LCDC_D22_VO_EBC_GDSP_ETH0_MDIO_M0_PDM1_SDI3_M2_DSMC_DATA15_FLEXBUS0_D7_UART1_RTSN_M2_SPI2_CSN1_M2_PWM1_CH1_M3_GPIO3_A5_d_A9
A11  U$1:VO_LCDC_D16_VO_EBC_SDCE0_ETH0_TXCTL_M0_PDM1_SDI0_M2_DSMC_DATA10_FLEXBUS0_D2_UART9_TX_M1_I2C8_SCL_M3_GPIO3_B3_d_A11
A13  U$1:VO_LCDC_D17_VO_EBC_SDCE1_ETH0_RXD0_M0_PDM1_SDI1_M2_DSMC_DATA11_FLEXBUS0_D3_UART9_RX_M1_I2C8_SDA_M3_GPIO3_B2_d_A13
A15  U$1:VI_CIF_D2_ETH1_TXD2_M0_SAI2_LRCK_M1_PDM1_SDI3_M0_UART11_RTSN_M1_SPI1_MISO_M1_PWM0_CH0_M2_GPIO2_C3_d_A15
A17  U$1:VI_CIF_D5_ETH1_RXD2_M0_ETH0_PTP_REFCLK_M1_PDM1_SDI1_M0_UART9_RX_M0_PWM1_CH0_M2_GPIO2_C0_d_A17
A19  U$1:VI_CIF_D9_SDMMC1_PWREN_M1_ETH0_TXD2_M1_SAI0_SDI3_M0_PDM0_SDI0_M3_UART7_CTSN_M0_SPI4_MOSI_M3_SATA0_ACTLED_M0_GPIO2_B4_d_A19
A21  U$1:VI_CIF_D7_ETH1_PTP_REFCLK_M1_ETH0_RXD3_M1_SAI0_SCLK_M0_UART7_TX_M0_UART8_RTSN_M1_I2C8_SCL_M2_GPIO2_B6_d_A21
A23  U$1:SDMMC0_D2_FSPI1_D2_M0_DSM_AUD_RP_M0_SAI3_LRCK_M3_JTAG_TCK_M0_UART5_RTSN_M2_SPI0_CSN1_M1_CAN1_RX_M0_I3C1_SCL_M1_GPIO2_A2_d_A23
A25  U$1:SARADC_IN0_BOOT_A25
A26  U$1:ETH1_TXCTL_M1_FSPI1_D2_M1_PDM0_SDI0_M2_UART2_TX_M0_I2C8_SCL_M1_SATA_CPPOD_GPIO1_C6_d_A26
A27  U$1:ETH1_TXD2_M1_SDMMC1_D3_M0_SAI3_SDI_M1_UART3_RTSN_M2_SPI1_CSN0_M0_GPIO1_B7_d_A27
A28  U$1:ETH1_RXD2_M1_SDMMC1_D0_M0_SAI3_SCLK_M1_I2C9_SDA_M1_SPI1_CLK_M0_PCIE1_CLKREQN_M1_PWM1_CH0_M1_GPIO1_B_A28
A29  U$1:VSS_2_A29
AA28  U$2:UART0_RX_M0_JTAG_TMS_M1_GPIO0_D5_u_AA28
AB1  U$2:LP4_DQ7_A_LP4X_DQ7_A_LP5_DQ7_A_AB1
AB28  U$2:I2C0_SCL_M1_UART8_TX_M2_I3C0_SCL_M0_GPIO0_C1_d_AB28
AB29  U$2:I2C2_SDA_M0_UART1_RX_M0_CPULIT_AVS_PWM1_CH3_M0_GPIO0_C0_d_AB29
AC1  U$2:LP4_DQ6_A_LP4X_DQ6_A_LP5_DQ6_A_AC1
AC28  U$2:SAI0_SDI1_M1_SAI0_SDO3_M1_PDM0_SDI1_M0_SPI0_MISO_M0_GPIO0_D1_d_AC28
AD28  U$2:REF_CLK1_OUT_I2C1_SCL_M1_UART4_TX_M2_PWM1_CH0_M0_GPIO0_B4_d_AD28
AD29  U$2:REF_CLK2_OUT_I2C1_SDA_M1_UART4_RX_M2_PWM1_CH1_M0_GPIO0_B5_d_AD29
AE1  U$2:LP4_DMI1_A_LP4X_DMI1_A_LP5_DMI1_A_AE1
AE28  U$2:MIPI_DPHY_CSI1_RX_D0N_AE28
AE29  U$2:MIPI_DPHY_CSI1_RX_D0P_AE29
AF1  U$2:LP4_DQ8_A_LP4X_DQ8_A_LP5_DQ8_A_AF1
AF28  U$2:MIPI_DPHY_CSI1_RX_D1N_AF28
AF29  U$2:MIPI_DPHY_CSI1_RX_D1P_AF29
AG28  U$2:MIPI_DPHY_CSI1_RX_D2N_MIPI_DPHY_CSI2_RX_D0N_AG28
AG29  U$2:MIPI_DPHY_CSI1_RX_D2P_MIPI_DPHY_CSI2_RX_D0P_AG29
AH1  U$2:LP4_DQ11_A_LP4X_DQ11_A_LP5_DQ11_A_AH1
AH28  U$2:MIPI_DPHY_CSI1_RX_D3N_MIPI_DPHY_CSI2_RX_D1N_AH28
AH29  U$2:MIPI_DPHY_CSI1_RX_D3P_MIPI_DPHY_CSI2_RX_D1P_AH29
AJ1  U$2:SAI4_SCLK_M2_VP2_SYNC_OUT_I2C6_SDA_M3_SPI4_CLK_M0_CAN1_RX_M1_PWM2_CH3_M1_GPIO4_C7_d_AJ1
AJ28  U$2:HDMI_TX_D2P_EDP_TX_D2P_AJ28
AJ29  U$2:AVSS_0_AJ29
AK1  U$2:ISP_FLASH_TRIGOUT_M1_SAI4_SDO_M2_VP0_SYNC_OUT_SATA1_ACTLED_M1_I2C3_SDA_M3_SPI4_MOSI_M0_UART6_RX_M3_PWM2_CH5_M1_GPIO4_C5_d_AK1
AK2  U$2:DSM_AUD_LN_M1_HDMI_TX_HPDIN_M0_PCIE1_CLKREQN_M3_I2C7_SDA_M3_EDP_TX_HPDIN_M0_UART11_RX_M2_PWM0_CH1_M1_GPIO4_C1_d_AK2
AK3  U$2:DSM_AUD_LP_M1_SAI4_MCLK_M2_HDMI_TX_CEC_M0_I2C7_SCL_M3_SPI4_CSN1_M0_UART11_TX_M2_PWM1_CH5_M1_GPIO4_C0_d_AK3
AK4  U$2:UFS_REFCLK_GPIO4_D1_d_AK4
AK5  U$2:OSC_UFS_XIN_AK5
AK6  U$2:AVSS_1_AK6
AK7  U$2:UFS_RX_D1P_AK7
AK8  U$2:UFS_RX_D0P_AK8
AK9  U$2:USB2_OTG0_DP_AK9
AK10  U$2:USB3_OTG0_SSRX1P_DP_TX_D0P_AK10
AK11  U$2:USB3_OTG0_SSTX1N_DP_TX_D1N_AK11
AK12  U$2:USB3_OTG0_SSRX2P_DP_TX_D2P_AK12
AK13  U$2:USB3_OTG0_SSTX2N_DP_TX_D3N_AK13
AK14  U$2:AVSS_2_AK14
AK15  U$2:MIPI_DPHY_DSI_TX_D0N_MIPI_CPHY_DSI_TX_TRIO0_A_AK15
AK16  U$2:MIPI_DPHY_DSI_TX_D1N_MIPI_CPHY_DSI_TX_TRIO0_C_AK16
AK17  U$2:MIPI_DPHY_DSI_TX_CLKN_MIPI_CPHY_DSI_TX_TRIO1_B_AK17
AK18  U$2:MIPI_DPHY_DSI_TX_D2N_MIPI_CPHY_DSI_TX_TRIO2_A_AK18
AK19  U$2:MIPI_DPHY_DSI_TX_D3N_MIPI_CPHY_DSI_TX_TRIO2_C_AK19
AK20  U$2:MIPI_DPHY_CSI0_RX_D0P_MIPI_CPHY_CSI_RX_TRIO0_B_AK20
AK21  U$2:MIPI_DPHY_CSI0_RX_D1P_MIPI_CPHY_CSI_RX_TRIO1_A_AK21
AK22  U$2:MIPI_DPHY_CSI0_RX_CLKP_MIPI_CPHY_CSI_RX_TRIO1_C_AK22
AK23  U$2:MIPI_DPHY_CSI0_RX_D2P_MIPI_CPHY_CSI_RX_TRIO2_B_AK23
AK24  U$2:MIPI_DPHY_CSI0_RX_D3P_NO_USE_AK24
AK25  U$2:AVSS_3_AK25
AK26  U$2:HDMI_TX_D3N_EDP_TX_D3N_AK26
AK27  U$2:HDMI_TX_D0N_EDP_TX_D0N_AK27
AK28  U$2:HDMI_TX_D1P_EDP_TX_D1P_AK28
AK29  U$2:HDMI_TX_D2N_EDP_TX_D2N_AK29
AL1  U$2:VSS_6_AL1
AL2  U$2:DSM_AUD_RP_M1_HDMI_TX_SCL_I2C2_SCL_M3_CAN0_TX_M1_UART9_TX_M2_PWM2_CH0_M1_GPIO4_C2_d_AL2
AL3  U$2:ISP_PRELIGHT_TRIG_M1_SAI4_LRCK_M2_DP_HPDIN_M0_I2C3_SCL_M3_SPI4_CSN0_M0_UART6_TX_M3_PWM2_CH6_M1_GPIO4_C4_d_AL3
AL4  U$2:AVSS_4_AL4
AL5  U$2:OSC_UFS_XOUT_AL5
AL6  U$2:UFS_RX_D1N_AL6
AL7  U$2:UFS_RX_D0N_AL7
AL8  U$2:AVSS_5_AL8
AL9  U$2:USB2_OTG0_DM_AL9
AL10  U$2:USB3_OTG0_SSRX1N_DP_TX_D0N_AL10
AL11  U$2:USB3_OTG0_SSTX1P_DP_TX_D1P_AL11
AL12  U$2:USB3_OTG0_SSRX2N_DP_TX_D2N_AL12
AL13  U$2:USB3_OTG0_SSTX2P_DP_TX_D3P_AL13
AL14  U$2:AVSS_6_AL14
AL15  U$2:MIPI_DPHY_DSI_TX_D0P_MIPI_CPHY_DSI_TX_TRIO0_B_AL15
AL16  U$2:MIPI_DPHY_DSI_TX_D1P_MIPI_CPHY_DSI_TX_TRIO1_A_AL16
AL17  U$2:MIPI_DPHY_DSI_TX_CLKP_MIPI_CPHY_DSI_TX_TRIO1_C_AL17
AL18  U$2:MIPI_DPHY_DSI_TX_D2P_MIPI_CPHY_DSI_TX_TRIO2_B_AL18
AL19  U$2:MIPI_DPHY_DSI_TX_D3P_NO_USE_AL19
AL20  U$2:MIPI_DPHY_CSI0_RX_D0N_MIPI_CPHY_CSI_RX_TRIO0_A_AL20
AL21  U$2:MIPI_DPHY_CSI0_RX_D1N_MIPI_CPHY_CSI_RX_TRIO0_C_AL21
AL22  U$2:MIPI_DPHY_CSI0_RX_CLKN_MIPI_CPHY_CSI_RX_TRIO1_B_AL22
AL23  U$2:MIPI_DPHY_CSI0_RX_D2N_MIPI_CPHY_CSI_RX_TRIO2_A_AL23
AL24  U$2:MIPI_DPHY_CSI0_RX_D3N_MIPI_CPHY_CSI_RX_TRIO2_C_AL24
AL25  U$2:AVSS_7_AL25
AL26  U$2:HDMI_TX_D3P_EDP_TX_D3P_AL26
AL28  U$2:HDMI_TX_D1N_EDP_TX_D1N_AL28
AL29  U$2:AVSS_8_AL29
B1  U$1:LP4_DQ9_B_LP4X_DQ9_B_LP5_DQ9_B_B1
B2  U$1:LP4_DQ10_B_LP4X_DQ10_B_LP5_DQ10_B_B2
B3  U$1:LP4_DQS1N_B_LP4X_DQS1N_B_LP5_RDQS1N_B_B3
B4  U$1:LP4_DMI0_B_LP4X_DMI0_B_LP5_DMI0_B_B4
B5  U$1:VSS_3_B5
B6  U$1:SAI1_SDO3_M0_SAI1_SDI1_M0_PDM1_SDI1_M1_FLEXBUS1_D15_M1_SPI4_MISO_M2_MIPI_TE_M0_GPIO4_B2_d_B6
B7  U$1:SAI1_SDO2_M0_SAI1_SDI2_M0_PDM1_SDI2_M1_FLEXBUS1_D14_M1_SPI4_MOSI_M2_UART5_RX_M1_UART6_CTSN_M0_UART2_CTSN_M1_GPIO4_B1_d_B7
B8  U$1:SPDIF_RX0_M0_FLEXBUS0_CSN_M4_UART2_RX_M1_I2C3_SDA_M0_CAN1_RX_M2_GPIO4_B4_d_B8
B9  U$1:VO_LCDC_D9_VO_EBC_SDDO9_ETH0_TXD3_M0_SAI2_SCLK_M2_DSMC_INT1_FLEXBUS0_D9_UART11_RTSN_M0_SPI4_MISO_M1_I2C9_SCL_M3_PWM2_CH0_M3_GPIO3_C2_d_B9
B10  U$1:VO_LCDC_D15_VO_EBC_SDDO15_ETH0_TXD1_M0_SPDIF_RX1_M0_DSMC_DATA9_FLEXBUS0_D1_UART9_RTSN_M1_PWM1_CH4_M3_GPIO3_B4_d_B10
B11  U$1:VO_LCDC_D13_VO_EBC_SDDO13_ETH0_TXCLK_M0_DSMC_DQS1_FLEXBUS0_CLK_SPI3_CSN0_M1_PWM0_CH1_M3_GPIO3_B6_d_B11
B12  U$1:VO_LCDC_D0_VO_EBC_SDDO0_ETH0_RXD2_M0_SAI2_SDO_M2_DSMC_CSN0_FLEXBUS1_D2_UART2_CTSN_M2_I3C1_SCL_M2_PWM2_CH5_M3_GPIO3_D3_d_B12
B13  U$1:VO_LCDC_D20_VO_EBC_VCOM_ETH0_RXCTL_M0_PDM1_CLK1_M2_DSMC_DATA13_FLEXBUS0_D5_UART1_TX_M2_UART10_RTSN_M0_GPIO3_A7_d_B13
B14  U$1:VO_LCDC_D19_VO_EBC_SDCE3_ETH0_MCLK_M0_SAI4_MCLK_M1_DSMC_CSN1_FLEXBUS0_D8_UART10_RX_M0_SPI2_MOSI_M2_PWM0_CH0_M3_GPIO3_B0_d_B14
B15  U$1:ETH1_TXD1_M0_SAI4_LRCK_M3_UART4_RTSN_M0_I2C5_SDA_M2_PWM0_CH1_M2_GPIO2_C7_d_B15
B16  U$1:ETH1_TXCTL_M0_SAI4_SDI_M3_UART4_TX_M0_I2C6_SCL_M2_PWM2_CH0_M2_GPIO2_D0_d_B16
B17  U$1:CAM_CLK0_OUT_M1_ETH1_RXD1_M0_SAI4_MCLK_M3_UART6_TX_M1_I3C1_SCL_M0_PWM2_CH2_M2_GPIO2_D2_d_B17
B18  U$1:ETH1_RXCTL_M0_UART6_RX_M1_I3C1_SDA_M0_PWM2_CH3_M2_GPIO2_D3_d_B18
B19  U$1:VI_CIF_D13_SDMMC1_D2_M1_ETH0_TXD1_M1_SAI0_SDI0_M0_PDM0_SDI3_M3_UART1_TX_M1_GPIO2_B0_d_B19
B20  U$1:VI_CIF_D14_SDMMC1_D1_M1_ETH0_TXCTL_M1_SAI0_SDO1_M0_UART8_RX_M1_I2C4_SDA_M2_GPIO2_A7_d_B20
B21  U$1:VI_CIF_D6_ETH0_RXD2_M1_SAI0_LRCK_M0_UART7_RX_M0_UART8_CTSN_M1_I2C8_SDA_M2_GPIO2_B7_d_B21
B22  U$1:VI_CIF_D15_SDMMC1_D0_M1_ETH0_RXD0_M1_SAI0_SDO0_M0_UART8_TX_M1_SPI4_CSN1_M3_I2C4_SCL_M2_GPIO2_A6_d_B22
B23  U$1:SDMMC0_D3_FSPI1_D3_M0_DSM_AUD_RN_M0_SAI3_SDI_M3_JTAG_TMS_M0_UART5_CTSN_M2_CAN1_TX_M0_I3C1_SDA_M1_GPIO2_A3_d_B23
B24  U$1:SDMMC0_D0_FSPI1_D0_M0_DSM_AUD_LP_M0_UART0_RX_M1_UART7_RX_M2_I2C8_SCL_M0_SPI0_MOSI_M1_CAN0_RX_M0_PWM2_CH2_M0_GPIO2_A0_d_B24
B25  U$1:SDMMC0_D1_FSPI1_D1_M0_DSM_AUD_LN_M0_SAI3_MCLK_M3_UART0_TX_M1_UART7_TX_M2_I2C8_SDA_M0_SPI0_MISO_M1_CAN0_TX_M0_PWM2_CH3_M0_GPIO2_A1_d_B25
B26  U$1:ETH1_TXD3_M1_SDMMC1_CMD_M0_PDM0_SDI2_M2_UART3_TX_M2_SPI1_CSN1_M0_PWM0_CH0_M1_GPIO1_C0_d_B26
B27  U$1:ETH1_RXD3_M1_SDMMC1_D1_M0_SAI3_LRCK_M1_I2C9_SCL_M1_SPI1_MOSI_M0_PWM1_CH1_M1_GPIO1_B5_d_B27
B28  U$1:ETH1_TXD1_M1_FSPI1_D1_M1_UART4_RX_M1_UART2_CTSN_M0_SPI2_MISO_M1_PCIE1_BUTTONRSTN_GPIO1_C5_d_B28
B29  U$1:ETH1_PPSCLK_M1_SDMMC1_PWREN_M0_FSPI1_RSTN_M1_FSPI1_CSN1_M1_UART4_RTSN_M1_I2C6_SCL_M1_SPI2_CSN1_M1_PWM1_CH2_M1_GPIO1_C2_u_B29
C1  U$1:VSS_4_C1
C28  U$1:ETH1_MDIO_M1_SAI2_SDI_M0_I3C0_SDA_M1_PWM1_CH4_M1_GPIO1_D3_d_C28
C29  U$1:ETH1_RXD1_M1_SAI2_SDO_M0_UART10_TX_M1_GPIO1_D0_d_C29
D1  U$1:LP4_DQ15_B_LP4X_DQ15_B_LP5_DQ15_B_D1
D28  U$1:EMMC_D6_SAI3_LRCK_M0_PDM0_CLK1_M1_SPI0_MISO_M2_I2C9_SDA_M0_GPIO1_A6_u_D28
E1  U$1:LP4_DQ14_B_LP4X_DQ14_B_LP5_DQ14_B_E1
E28  U$1:EMMC_D0_FSPI0_D0_SAI0_SCLK_M2_UART7_RTSN_M1_I2C2_SCL_M1_GPIO1_A0_u_E28
E29  U$1:EMMC_D1_FSPI0_D1_SAI0_LRCK_M2_UART7_CTSN_M1_I2C2_SDA_M1_GPIO1_A1_u_E29
F28  U$1:EMMC_D3_FSPI0_D3_SAI0_SDO2_M2_SAI0_SDI2_M2_PDM0_SDI1_M1_UART7_RX_M1_UART6_CTSN_M2_GPIO1_A3_u_F28
G1  U$1:LP4_DQ7_B_LP4X_DQ7_B_LP5_DQ7_B_G1
G28  U$1:EMMC_D5_SAI3_SCLK_M0_PDM0_SDI2_M1_SPI0_MOSI_M2_I2C9_SCL_M0_GPIO1_A5_u_G28
G29  U$1:AVSS1_0_G29
H1  U$1:LP4_DQS0P_B_LP4X_DQS0P_B_LP5_RDQS0P_B_H1
H28  U$1:MIPI_DPHY_CSI3_RX_D0P_H28
H29  U$1:MIPI_DPHY_CSI3_RX_D0N_H29
J28  U$1:MIPI_DPHY_CSI3_RX_D1P_J28
J29  U$1:MIPI_DPHY_CSI3_RX_D1N_J29
K1  U$1:LP4_DQ3_B_LP4X_DQ3_B_LP5_DQ3_B_K1
K28  U$1:MIPI_DPHY_CSI3_RX_D2P_MIPI_DPHY_CSI4_RX_D0_K28
K29  U$1:MIPI_DPHY_CSI3_RX_D2N_MIPI_DPHY_CSI4_RX_D0N_K29
L1  U$1:LP4_A0_B_LP4X_A0_B_LP5_A0_B_L1
L28  U$1:MIPI_DPHY_CSI3_RX_D3P_MIPI_DPHY_CSI4_RX_D1P_L28
L29  U$1:MIPI_DPHY_CSI3_RX_D3N_MIPI_DPHY_CSI4_RX_D1N_L29
M28  U$1:PCIE1_RXP_SATA1_RXP_USB3_OTG1_SSRXP_M28
M29  U$1:PCIE1_RXN_SATA1_RXN_USB3_OTG1_SSRXN_M29
N1  U$1:LP4_CLKN_B_LP4X_CLKN_B_LP5_CLKN_B_N1
N28  U$1:PCIE1_TXP_SATA1_TXP_USB3_OTG1_SSTXP_N28
N29  U$1:PCIE1_TXN_SATA1_TXN_USB3_OTG1_SSTXN_N29
P1  U$2:LP4_CLKN_A_LP4X_CLKN_A_LP5_CLKN_A_P1
P28  U$2:PCIE0_TXN_SATA0_TXN_P28
P29  U$2:PCIE0_TXP_SATA0_TXP_P29
R28  U$2:PCIE0_RXP_SATA0_RXP_R28
R29  U$2:PCIE0_RXN_SATA0_RXN_R29
T1  U$2:LP4_A0_A_LP4X_A0_A_LP5_A0_A_T1
T28  U$2:AVSS1_1_T28
T29  U$2:AVSS1_2_T29
U1  U$2:LP4_DQ3_A_LP4X_DQ3_A_LP5_DQ3_A_U1
U28  U$2:OSC_XIN_U28
U29  U$2:OSC_XOUT_U29
V28  U$2:VSS_5_V28
V29  U$2:REF_CLK0_OUT_AUPLL_CLK_IN_M0_GPIO0_A0_d_V29
W1  U$2:LP4_DQ0_A_LP4X_DQ0_A_LP5_DQ0_A_W1
W28  U$2:NPOR_W28
Y1  U$2:LP4_DQS0N_A_LP4X_DQS0N_A_LP5_RDQS0N_A_Y1
Y28  U$2:PWR_CTRL1_TSADC_CTRL_M1_GPIO0_A3_d_Y28
Y29  U$2:PWR_CTRL3_I2C6_SDA_M0_GPIO0_A5_d_Y29

## Footprint FCCSP-698_L17.2-W16.1-TL_RK3576 (pad centres in mm)
smd 0.24 x 0.24: 1A1 -7.2,7.2; 1A2 -6.6,7.2; 1A3 -6,7.2; 1A4 -5.4,7.2; 1A5 -4.8,7.2; 1A6 -4.2,7.2; 1A7 -3.6,7.2; 1A8 -3,7.2; 1A9 -2.4,7.2; 1A10 -1.8,7.2; 1A11 -1.2,7.2; 1A12 -0.6,7.2; 1A13 0,7.2; 1A14 0.6,7.2; 1A15 1.2,7.2; 1A16 1.8,7.2; 1A17 2.4,7.2; 1A18 3,7.2; 1A19 3.6,7.2; 1A20 4.2,7.2; 1A21 4.8,7.2; 1A22 5.4,7.2; 1A23 6,7.2; 1A24 6.6,7.2; 1AA1 -7.2,-4.8; 1AA2 -6.6,-4.8; 1AA3 -6,-4.8; 1AA4 -5.4,-4.8; 1AA5 -4.8,-4.8; 1AA6 -4.2,-4.8; 1AA20 4.2,-4.8; 1AA21 4.8,-4.8; 1AA22 5.4,-4.8; 1AA23 6,-4.8; 1AA24 6.6,-4.8; 1AB1 -7.2,-5.4; 1AB2 -6.6,-5.4; 1AB3 -6,-5.4; 1AB4 -5.4,-5.4; 1AB5 -4.8,-5.4; 1AB6 -4.2,-5.4; 1AB20 4.2,-5.4; 1AB21 4.8,-5.4; 1AB22 5.4,-5.4; 1AB23 6,-5.4; 1AB24 6.6,-5.4; 1AC1 -7.2,-6; 1AC2 -6.6,-6; 1AC3 -6,-6; 1AC4 -5.4,-6; 1AC5 -4.8,-6; 1AC6 -4.2,-6; 1AC20 4.2,-6; 1AC21 4.8,-6; 1AC22 5.4,-6; 1AC23 6,-6; 1AC24 6.6,-6; 1AD1 -7.2,-6.6; 1AD2 -6.6,-6.6; 1AD3 -6,-6.6; 1AD4 -5.4,-6.6; 1AD5 -4.8,-6.6; 1AD6 -4.2,-6.6; 1AD20 4.2,-6.6; 1AD21 4.8,-6.6; 1AD22 5.4,-6.6; 1AD23 6,-6.6; 1AD24 6.6,-6.6; 1AE1 -7.2,-7.2; 1AE2 -6.6,-7.2; 1AE3 -6,-7.2; 1AE4 -5.4,-7.2; 1AE6 -4.2,-7.2; 1AE20 4.2,-7.2; 1AE21 4.8,-7.2; 1AE23 6,-7.2; 1AE24 6.6,-7.2; 1B1 -7.2,6.6; 1B2 -6.6,6.6; 1B3 -6,6.6; 1B5 -4.8,6.6; 1B6 -4.2,6.6; 1B7 -3.6,6.6; 1B9 -2.4,6.6; 1B10 -1.8,6.6; 1B12 -0.6,6.6; 1B13 0,6.6; 1B15 1.2,6.6; 1B16 1.8,6.6; 1B18 3,6.6; 1B19 3.6,6.6; 1B21 4.8,6.6; 1B22 5.4,6.6; 1B23 6,6.6; 1B24 6.6,6.6; 1C1 -7.2,6; 1C2 -6.6,6; 1C3 -6,6; 1C4 -5.4,6; 1C5 -4.8,6; 1C6 -4.2,6; 1C7 -3.6,6; 1C9 -2.4,6; 1C10 -1.8,6; 1C12 -0.6,6; 1C13 0,6; 1C15 1.2,6; 1C16 1.8,6; 1C18 3,6; 1C19 3.6,6; 1C21 4.8,6; 1C22 5.4,6; 1C23 6,6; 1C24 6.6,6; 1D1 -7.2,5.4; 1D2 -6.6,5.4; 1D3 -6,5.4; 1D4 -5.4,5.4; 1D5 -4.8,5.4; 1D6 -4.2,5.4; 1D7 -3.6,5.4; 1D9 -2.4,5.4; 1D10 -1.8,5.4; 1D12 -0.6,5.4; 1D13 0,5.4; 1D15 1.2,5.4; 1D16 1.8,5.4; 1D18 3,5.4; 1D19 3.6,5.4; 1D21 4.8,5.4; 1D22 5.4,5.4; 1D23 6,5.4; 1D24 6.6,5.4; 1E1 -7.2,4.8; 1E2 -6.6,4.8; 1E3 -6,4.8; 1E4 -5.4,4.8; 1E5 -4.8,4.8; 1E6 -4.2,4.8; 1E7 -3.6,4.8; 1E9 -2.4,4.8; 1E10 -1.8,4.8; 1E12 -0.6,4.8; 1E13 0,4.8; 1E15 1.2,4.8; 1E16 1.8,4.8; 1E18 3,4.8; 1E19 3.6,4.8; 1E21 4.8,4.8; 1E22 5.4,4.8; 1E23 6,4.8; 1E24 6.6,4.8; 1F1 -7.2,4.2; 1F2 -6.6,4.2; 1F3 -6,4.2; 1F4 -5.4,4.2; 1F5 -4.8,4.2; 1F6 -4.2,4.2; 1F20 4.2,4.2; 1F21 4.8,4.2; 1F22 5.4,4.2; 1F23 6,4.2; 1F24 6.6,4.2; 1G1 -7.2,3.6; 1G2 -6.6,3.6; 1G3 -6,3.6; 1G4 -5.4,3.6; 1G5 -4.8,3.6; 1G6 -4.2,3.6; 1G20 4.2,3.6; 1G21 4.8,3.6; 1G22 5.4,3.6; 1G23 6,3.6; 1G24 6.6,3.6; 1H1 -7.2,3; 1H2 -6.6,3; 1H3 -6,3; 1H4 -5.4,3; 1H5 -4.8,3; 1H6 -4.2,3; 1H20 4.2,3; 1H21 4.8,3; 1H22 5.4,3; 1H23 6,3; 1H24 6.6,3; 1J1 -7.2,2.4; 1J2 -6.6,2.4; 1J3 -6,2.4; 1J4 -5.4,2.4; 1J5 -4.8,2.4; 1J6 -4.2,2.4; 1J20 4.2,2.4; 1J21 4.8,2.4; 1J22 5.4,2.4; 1J23 6,2.4; 1J24 6.6,2.4; 1K1 -7.2,1.8; 1K2 -6.6,1.8; 1K3 -6,1.8; 1K4 -5.4,1.8; 1K5 -4.8,1.8; 1K6 -4.2,1.8; 1K20 4.2,1.8; 1K21 4.8,1.8; 1K22 5.4,1.8; 1K23 6,1.8; 1K24 6.6,1.8; 1L1 -7.2,1.2; 1L2 -6.6,1.2; 1L3 -6,1.2; 1L4 -5.4,1.2; 1L5 -4.8,1.2; 1L6 -4.2,1.2; 1L20 4.2,1.2; 1L21 4.8,1.2; 1L22 5.4,1.2; 1L23 6,1.2; 1L24 6.6,1.2; 1M1 -7.2,0.6; 1M2 -6.6,0.6; 1M3 -6,0.6; 1M4 -5.4,0.6; 1M5 -4.8,0.6; 1M6 -4.2,0.6; 1M20 4.2,0.6; 1M21 4.8,0.6; 1M22 5.4,0.6; 1M23 6,0.6; 1M24 6.6,0.6; 1N1 -7.2,0; 1N2 -6.6,0; 1N3 -6,0; 1N4 -5.4,0; 1N5 -4.8,0; 1N6 -4.2,0; 1N20 4.2,0; 1N21 4.8,0; 1N22 5.4,0; 1N23 6,0; 1N24 6.6,0; 1P1 -7.2,-0.6; 1P2 -6.6,-0.6; 1P3 -6,-0.6; 1P4 -5.4,-0.6; 1P5 -4.8,-0.6; 1P6 -4.2,-0.6; 1P20 4.2,-0.6; 1P21 4.8,-0.6; 1P22 5.4,-0.6; 1P23 6,-0.6; 1P24 6.6,-0.6; 1R1 -7.2,-1.2; 1R2 -6.6,-1.2; 1R3 -6,-1.2; 1R4 -5.4,-1.2; 1R5 -4.8,-1.2; 1R6 -4.2,-1.2; 1R24 6.6,-1.2; 1T1 -7.2,-1.8; 1T2 -6.6,-1.8; 1T3 -6,-1.8; 1T4 -5.4,-1.8; 1T5 -4.8,-1.8; 1T6 -4.2,-1.8; 1T20 4.2,-1.8; 1T21 4.8,-1.8; 1T22 5.4,-1.8; 1T23 6,-1.8; 1T24 6.6,-1.8; 1U1 -7.2,-2.4; 1U2 -6.6,-2.4; 1U3 -6,-2.4; 1U4 -5.4,-2.4; 1U5 -4.8,-2.4; 1U6 -4.2,-2.4; 1U20 4.2,-2.4; 1U21 4.8,-2.4; 1U22 5.4,-2.4; 1U23 6,-2.4; 1U24 6.6,-2.4; 1V1 -7.2,-3; 1V2 -6.6,-3; 1V3 -6,-3; 1V4 -5.4,-3; 1V5 -4.8,-3; 1V6 -4.2,-3; 1V24 6.6,-3; 1W1 -7.2,-3.6; 1W2 -6.6,-3.6; 1W3 -6,-3.6; 1W4 -5.4,-3.6; 1W5 -4.8,-3.6; 1W6 -4.2,-3.6; 1W20 4.2,-3.6; 1W21 4.8,-3.6; 1W22 5.4,-3.6; 1W23 6,-3.6; 1W24 6.6,-3.6; 1Y1 -7.2,-4.2; 1Y2 -6.6,-4.2; 1Y3 -6,-4.2; 1Y4 -5.4,-4.2; 1Y5 -4.8,-4.2; 1Y6 -4.2,-4.2; 1Y20 4.2,-4.2; 1Y21 4.8,-4.2; 1Y22 5.4,-4.2; 1Y23 6,-4.2; 1Y24 6.6,-4.2; 2A1 -3.57,3.9; 2A2 -2.92,3.9; 2A3 -2.27,3.9; 2A4 -1.62,3.9; 2A5 -0.98,3.9; 2A6 -0.33,3.9; 2A7 0.33,3.9; 2A8 0.98,3.9; 2A9 1.63,3.9; 2A10 2.28,3.9; 2A11 2.93,3.9; 2A12 3.58,3.9; 2B1 -3.57,3.25; 2B2 -2.92,3.25; 2B3 -2.27,3.25; 2B4 -1.62,3.25; 2B5 -0.98,3.25; 2B6 -0.33,3.25; 2B7 0.33,3.25; 2B8 0.98,3.25; 2B9 1.63,3.25; 2B10 2.28,3.25; 2B11 2.93,3.25; 2B12 3.58,3.25; 2C1 -3.57,2.6; 2C2 -2.92,2.6; 2C3 -2.27,2.6; 2C4 -1.62,2.6; 2C5 -0.98,2.6; 2C6 -0.33,2.6; 2C7 0.33,2.6; 2C8 0.98,2.6; 2C9 1.63,2.6; 2C10 2.28,2.6; 2C11 2.93,2.6; 2C12 3.58,2.6; 2D1 -3.57,1.95; 2D2 -2.92,1.95; 2D3 -2.27,1.95; 2D4 -1.62,1.95; 2D5 -0.98,1.95; 2D6 -0.33,1.95; 2D7 0.33,1.95; 2D8 0.98,1.95; 2D9 1.63,1.95; 2D10 2.28,1.95; 2D11 2.93,1.95; 2D12 3.58,1.95; 2E1 -3.57,1.3; 2E2 -2.92,1.3; 2E3 -2.27,1.3; 2E4 -1.62,1.3; 2E5 -0.98,1.3; 2E6 -0.33,1.3; 2E7 0.33,1.3; 2E8 0.98,1.3; 2E9 1.63,1.3; 2E10 2.28,1.3; 2E11 2.93,1.3; 2E12 3.58,1.3; 2F1 -3.57,0.65; 2F2 -2.92,0.65; 2F3 -2.27,0.65; 2F4 -1.62,0.65; 2F5 -0.98,0.65; 2F6 -0.33,0.65; 2F7 0.33,0.65; 2F8 0.98,0.65; 2F9 1.63,0.65; 2F10 2.28,0.65; 2F11 2.93,0.65; 2F12 3.58,0.65; 2G1 -3.57,0; 2G2 -2.92,0; 2G3 -2.27,0; 2G4 -1.62,0; 2G5 -0.98,0; 2G6 -0.33,0; 2G7 0.33,0; 2G8 0.98,0; 2G9 1.63,0; 2G10 2.28,0; 2G11 2.93,0; 2G12 3.58,0; 2H1 -3.57,-0.65; 2H2 -2.92,-0.65; 2H3 -2.27,-0.65; 2H4 -1.62,-0.65; 2H5 -0.98,-0.65; 2H6 -0.33,-0.65; 2H7 0.33,-0.65; 2H8 0.98,-0.65; 2H9 1.63,-0.65; 2H10 2.28,-0.65; 2H11 2.93,-0.65; 2H12 3.58,-0.65; 2J1 -3.57,-1.3; 2J2 -2.92,-1.3; 2J3 -2.27,-1.3; 2J4 -1.62,-1.3; 2J5 -0.98,-1.3; 2J6 -0.33,-1.3; 2J7 0.33,-1.3; 2J8 0.98,-1.3; 2J9 1.63,-1.3; 2J10 2.28,-1.3; 2J11 2.93,-1.3; 2J12 3.58,-1.3; 2K1 -3.57,-1.95; 2K2 -2.92,-1.95; 2K3 -2.27,-1.95; 2K4 -1.62,-1.95; 2K5 -0.98,-1.95; 2K6 -0.33,-1.95; 2K7 0.33,-1.95; 2K8 0.98,-1.95; 2K9 1.63,-1.95; 2K10 2.28,-1.95; 2K11 2.93,-1.95; 2K12 3.58,-1.95; 2L1 -3.57,-2.6; 2L2 -2.92,-2.6; 2L3 -2.27,-2.6; 2L4 -1.62,-2.6; 2L5 -0.98,-2.6; 2L6 -0.33,-2.6; 2L7 0.33,-2.6; 2L8 0.98,-2.6; 2L9 1.63,-2.6; 2L10 2.28,-2.6; 2L11 2.93,-2.6; 2L12 3.58,-2.6; 2M1 -3.57,-3.25; 2M2 -2.92,-3.25; 2M3 -2.27,-3.25; 2M4 -1.62,-3.25; 2M5 -0.98,-3.25; 2M6 -0.33,-3.25; 2M7 0.33,-3.25; 2M8 0.98,-3.25; 2M9 1.63,-3.25; 2M10 2.28,-3.25; 2M11 2.93,-3.25; 2M12 3.58,-3.25; 2N1 -3.57,-3.9; 2N2 -2.92,-3.9; 2N3 -2.27,-3.9; 2N4 -1.62,-3.9; 2N5 -0.98,-3.9; 2N6 -0.33,-3.9; 2N7 0.33,-3.9; 2N8 0.98,-3.9; 2N9 1.63,-3.9; 2N10 2.28,-3.9; 2N11 2.93,-3.9; 2N12 3.58,-3.9; 2P1 -3.57,-4.55; 2P2 -2.92,-4.55; 2P3 -2.27,-4.55; 2P4 -1.62,-4.55; 2P5 -0.98,-4.55; 2P6 -0.33,-4.55; 2P7 0.33,-4.55; 2P8 0.98,-4.55; 2P9 1.63,-4.55; 2P10 2.28,-4.55; 2P11 2.93,-4.55; 2P12 3.58,-4.55; 2R1 -3.57,-5.2; 2R2 -2.92,-5.2; 2R3 -2.27,-5.2; 2R4 -1.62,-5.2; 2R5 -0.98,-5.2; 2R6 -0.33,-5.2; 2R7 0.33,-5.2; 2R8 0.98,-5.2; 2R9 1.63,-5.2; 2R10 2.28,-5.2; 2R11 2.93,-5.2; 2R12 3.58,-5.2; 2T1 -3.57,-5.85; 2T2 -2.92,-5.85; 2T3 -2.27,-5.85; 2T4 -1.62,-5.85; 2T5 -0.98,-5.85; 2T6 -0.33,-5.85; 2T7 0.33,-5.85; 2T8 0.98,-5.85; 2T9 1.63,-5.85; 2T10 2.28,-5.85; 2T11 2.93,-5.85; 2T12 3.58,-5.85; 2U1 -3.57,-6.5; 2U2 -2.92,-6.5; 2U3 -2.27,-6.5; 2U4 -1.62,-6.5; 2U5 -0.98,-6.5; 2U6 -0.33,-6.5; 2U7 0.33,-6.5; 2U8 0.98,-6.5; 2U9 1.63,-6.5; 2U10 2.28,-6.5; 2U11 2.93,-6.5; 2U12 3.58,-6.5; 2V1 -3.57,-7.15; 2V2 -2.92,-7.15; 2V3 -2.27,-7.15; 2V4 -1.62,-7.15; 2V5 -0.98,-7.15; 2V6 -0.33,-7.15; 2V7 0.33,-7.15; 2V8 0.98,-7.15; 2V9 1.63,-7.15; 2V10 2.28,-7.15; 2V11 2.93,-7.15; 2V12 3.58,-7.15; A1 -7.7,8.25; A2 -7.15,8.25; A3 -6.6,8.25; A4 -6.05,8.25; A5 -5.5,8.25; A7 -4.4,8.25; A9 -3.3,8.25; A11 -2.2,8.25; A13 -1.1,8.25; A15 0,8.25; A17 1.1,8.25; A19 2.2,8.25; A21 3.3,8.25; A23 4.4,8.25; A25 5.5,8.25; A26 6.05,8.25; A27 6.6,8.25; A28 7.15,8.25; A29 7.7,8.25; AA28 7.15,-2.75; AB1 -7.7,-3.3; AB28 7.15,-3.3; AB29 7.7,-3.3; AC1 -7.7,-3.85; AC28 7.15,-3.85; AD28 7.15,-4.4; AD29 7.7,-4.4; AE1 -7.7,-4.95; AE28 7.15,-4.95; AE29 7.7,-4.95; AF1 -7.7,-5.5; AF28 7.15,-5.5; AF29 7.7,-5.5; AG28 7.15,-6.05; AG29 7.7,-6.05; AH1 -7.7,-6.6; AH28 7.15,-6.6; AH29 7.7,-6.6; AJ1 -7.7,-7.15; AJ28 7.15,-7.15; AJ29 7.7,-7.15; AK1 -7.7,-7.7; AK2 -7.15,-7.7; AK3 -6.6,-7.7; AK4 -6.05,-7.7; AK5 -5.5,-7.7; AK6 -4.95,-7.7; AK7 -4.4,-7.7; AK8 -3.85,-7.7; AK9 -3.3,-7.7; AK10 -2.75,-7.7; AK11 -2.2,-7.7; AK12 -1.65,-7.7; AK13 -1.1,-7.7; AK14 -0.55,-7.7; AK15 0,-7.7; AK16 0.55,-7.7; AK17 1.1,-7.7; AK18 1.65,-7.7; AK19 2.2,-7.7; AK20 2.75,-7.7; AK21 3.3,-7.7; AK22 3.85,-7.7; AK23 4.4,-7.7; AK24 4.95,-7.7; AK25 5.5,-7.7; AK26 6.05,-7.7; AK27 6.6,-7.7; AK28 7.15,-7.7; AK29 7.7,-7.7; AL1 -7.7,-8.25; AL2 -7.15,-8.25; AL3 -6.6,-8.25; AL4 -6.05,-8.25; AL5 -5.5,-8.25; AL6 -4.95,-8.25; AL7 -4.4,-8.25; AL8 -3.85,-8.25; AL9 -3.3,-8.25; AL10 -2.75,-8.25; AL11 -2.2,-8.25; AL12 -1.65,-8.25; AL13 -1.1,-8.25; AL14 -0.55,-8.25; AL15 0,-8.25; AL16 0.55,-8.25; AL17 1.1,-8.25; AL18 1.65,-8.25; AL19 2.2,-8.25; AL20 2.75,-8.25; AL21 3.3,-8.25; AL22 3.85,-8.25; AL23 4.4,-8.25; AL24 4.95,-8.25; AL25 5.5,-8.25; AL26 6.05,-8.25; AL28 7.15,-8.25; AL29 7.7,-8.25; B1 -7.7,7.7; B2 -7.15,7.7; B3 -6.6,7.7; B4 -6.05,7.7; B5 -5.5,7.7; B6 -4.95,7.7; B7 -4.4,7.7; B8 -3.85,7.7; B9 -3.3,7.7; B10 -2.75,7.7; B11 -2.2,7.7; B12 -1.65,7.7; B13 -1.1,7.7; B14 -0.55,7.7; B15 0,7.7; B16 0.55,7.7; B17 1.1,7.7; B18 1.65,7.7; B19 2.2,7.7; B20 2.75,7.7; B21 3.3,7.7; B22 3.85,7.7; B23 4.4,7.7; B24 4.95,7.7; B25 5.5,7.7; B26 6.05,7.7; B27 6.6,7.7; B28 7.15,7.7; B29 7.7,7.7; C1 -7.7,7.15; C28 7.15,7.15; C29 7.7,7.15; D1 -7.7,6.6; D28 7.15,6.6; E1 -7.7,6.05; E28 7.15,6.05; E29 7.7,6.05; F28 7.15,5.5; G1 -7.7,4.95; G28 7.15,4.95; G29 7.7,4.95; H1 -7.7,4.4; H28 7.15,4.4; H29 7.7,4.4; J28 7.15,3.85; J29 7.7,3.85; K1 -7.7,3.3; K28 7.15,3.3; K29 7.7,3.3; L1 -7.7,2.75; L28 7.15,2.75; L29 7.7,2.75; M28 7.15,2.2; M29 7.7,2.2; N1 -7.7,1.65; N28 7.15,1.65; N29 7.7,1.65; P1 -7.7,1.1; P28 7.15,1.1; P29 7.7,1.1; R28 7.15,0.55; R29 7.7,0.55; T1 -7.7,0; T28 7.15,0; T29 7.7,0; U1 -7.7,-0.55; U28 7.15,-0.55; U29 7.7,-0.55; V28 7.15,-1.1; V29 7.7,-1.1; W1 -7.7,-1.65; W28 7.15,-1.65; Y1 -7.7,-2.2; Y28 7.15,-2.2; Y29 7.7,-2.2